# Altium footprint library ETA6003Q3Q.PcbLib: 3 footprints
Each footprint in its own frame and in the unit in brackets; x right, y up, seen from the top. Pads: shape width x height; smd on the part's side, far side on the other; paste and mask are expansions set on the pad; w line width, h text height; cw(c..) or ccw(c..) is an arc to the next point about the centre after c.
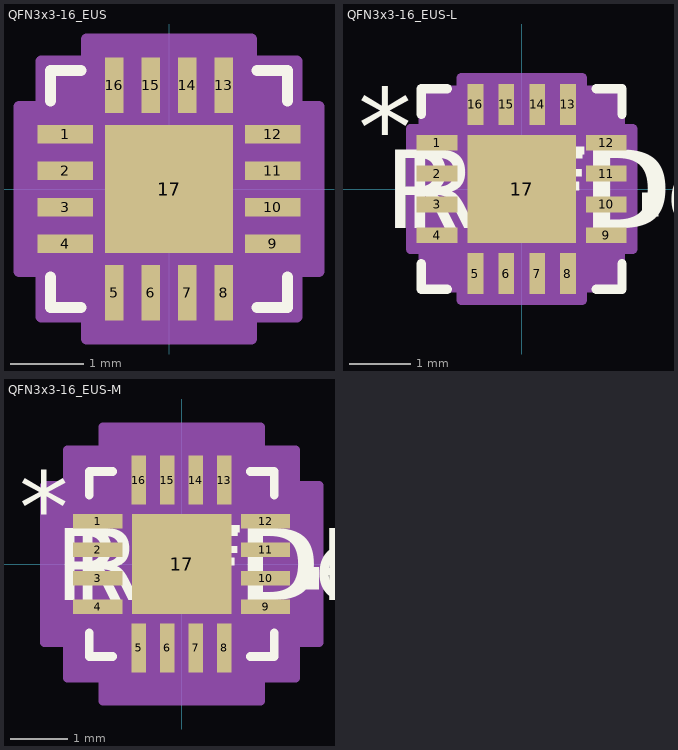
[diagram p0: the footprints below, top view; thin cyan lines are the x and y axes]

## QFN3x3-16_EUS [mil]
pads (17):
  rect 30x10 smd paste+0 mask+0: 1(-56,29.53) 2(-56,9.84) 3(-56,-9.84) 4(-56,-29.53) 9(56,-29.53) 10(56,-9.84) 11(56,9.84) 12(56,29.53)
  rect 10x30 smd paste+0 mask+0: 5(-29.53,-56) 6(-9.84,-56) 7(9.84,-56) 8(29.53,-56) 13(29.53,56) 14(9.84,56) 15(-9.84,56) 16(-29.53,56)
  rect 69x69 smd paste+0 mask+0: 17(0,0)
Top Overlay:
  lines w6: -64,-47.63 -64,-64 -47.63,-64 ; -64,47.63 -64,64 -47.63,64 ; 47.63,-64 64,-64 64,-47.63 ; 47.63,64 64,64 64,47.63
  text "." at -55,45 h50
Mechanical 13:
  lines w1: -59,9 -9,59 ; -59,-59 59,-59 59,59 -59,59 -59,-59 ; -59,-35.53 -59,-23.53 -59,-35.53 ; -59,-15.84 -59,-3.84 -59,-15.84 ; -59,3.84 -59,15.84 -59,3.84 ; -59,23.53 -59,35.53 -59,23.53 ; -35.53,-59 -23.53,-59 -35.53,-59 ; -35.53,59 -23.53,59 -35.53,59 ; -15.84,-59 -3.84,-59 -15.84,-59 ; -15.84,59 -3.84,59 -15.84,59 ; 3.84,-59 15.84,-59 3.84,-59 ; 3.84,59 15.84,59 3.84,59 ; 23.53,-59 35.53,-59 23.53,-59 ; 23.53,59 35.53,59 23.53,59 ; 59,-35.53 59,-23.53 59,-35.53 ; 59,-15.84 59,-3.84 59,-15.84 ; 59,3.84 59,15.84 59,3.84 ; 59,23.53 59,35.53 59,23.53
  text "*" at -53.5,14.37 h50
Mechanical 15:
  region: -44.53,-69 -69,-69 -69,-44.53 -81,-44.53 -81,44.53 -69,44.53 -69,69 -44.53,69 -44.53,81 44.53,81 44.53,69 69,69 69,44.53 81,44.53 81,-44.53 69,-44.53 69,-69 44.53,-69 44.53,-81 -44.53,-81
  lines w6: -81,-44.53 -69,-44.53 -69,-69 -44.53,-69 -44.53,-81 44.53,-81 44.53,-69 69,-69 69,-44.53 81,-44.53 81,44.53 69,44.53 69,69 44.53,69 44.53,81 -44.53,81 -44.53,69 -69,69 -69,44.53 -81,44.53 -81,-44.53
3D body "QFN3x3-16_EUS.step": height 32.09, standoff 0, extent -59.02,-59.02 59.02,59.02

## QFN3x3-16_EUS-L [mil]
pads (17):
  rect 26x10 smd paste+0 mask+0: 1(-54,29.53) 2(-54,9.84) 3(-54,-9.84) 4(-54,-29.53) 9(54,-29.53) 10(54,-9.84) 11(54,9.84) 12(54,29.53)
  rect 10x26 smd paste+0 mask+0: 5(-29.53,-54) 6(-9.84,-54) 7(9.84,-54) 8(29.53,-54) 13(29.53,54) 14(9.84,54) 15(-9.84,54) 16(-29.53,54)
  rect 69x69 smd paste+0 mask+0: 17(0,0)
Top Overlay:
  region: 77,-2.34 87,-2.34 87,-17.34 77,-17.34
  lines w6: -64,-47.63 -64,-64 -47.63,-64 ; -64,47.63 -64,64 -47.63,64 ; 47.63,-64 64,-64 64,-47.63 ; 47.63,64 64,64 64,47.63
  text "*" at -104.5,14.37 h50
  text "RefDes" at -75,-25 h50
  text "REFDES" at -87.5,-25 h50
Mechanical 13:
  lines w1: -59,9 -9,59 ; -59,-59 59,-59 59,59 -59,59 -59,-59 ; -59,-35.53 -59,-23.53 -59,-35.53 ; -59,-15.84 -59,-3.84 -59,-15.84 ; -59,3.84 -59,15.84 -59,3.84 ; -59,23.53 -59,35.53 -59,23.53 ; -35.53,-59 -23.53,-59 -35.53,-59 ; -35.53,59 -23.53,59 -35.53,59 ; -15.84,-59 -3.84,-59 -15.84,-59 ; -15.84,59 -3.84,59 -15.84,59 ; 3.84,-59 15.84,-59 3.84,-59 ; 3.84,59 15.84,59 3.84,59 ; 23.53,-59 35.53,-59 23.53,-59 ; 23.53,59 35.53,59 23.53,59 ; 59,-35.53 59,-23.53 59,-35.53 ; 59,-15.84 59,-3.84 59,-15.84 ; 59,3.84 59,15.84 59,3.84 ; 59,23.53 59,35.53 59,23.53
  text "*" at -53.5,14.37 h50
  text "RefDes2" at -87.5,-25 h50
Mechanical 15:
  region: -38.53,-63 -63,-63 -63,-38.53 -71,-38.53 -71,38.53 -63,38.53 -63,63 -38.53,63 -38.53,71 38.53,71 38.53,63 63,63 63,38.53 71,38.53 71,-38.53 63,-38.53 63,-63 38.53,-63 38.53,-71 -38.53,-71
  lines w6: -71,-38.53 -63,-38.53 -63,-63 -38.53,-63 -38.53,-71 38.53,-71 38.53,-63 63,-63 63,-38.53 71,-38.53 71,38.53 63,38.53 63,63 38.53,63 38.53,71 -38.53,71 -38.53,63 -63,63 -63,38.53 -71,38.53 -71,-38.53
3D body "QFN3x3-16_EUS.step": height 32.09, standoff 0, extent -59.02,-59.02 59.02,59.02

## QFN3x3-16_EUS-M [mil]
pads (17):
  rect 34x10 smd paste+0 mask+0: 1(-58,29.53) 2(-58,9.84) 3(-58,-9.84) 4(-58,-29.53) 9(58,-29.53) 10(58,-9.84) 11(58,9.84) 12(58,29.53)
  rect 10x34 smd paste+0 mask+0: 5(-29.53,-58) 6(-9.84,-58) 7(9.84,-58) 8(29.53,-58) 13(29.53,58) 14(9.84,58) 15(-9.84,58) 16(-29.53,58)
  rect 69x69 smd paste+0 mask+0: 17(0,0)
Top Overlay:
  region: 85,-2.34 95,-2.34 95,-17.34 85,-17.34
  lines w6: -64,-47.63 -64,-64 -47.63,-64 ; -64,47.63 -64,64 -47.63,64 ; 47.63,-64 64,-64 64,-47.63 ; 47.63,64 64,64 64,47.63
  text "REFDES" at -87.5,-25 h50
  text "RefDes" at -75,-25 h50
  text "*" at -112.5,14.37 h50
Mechanical 13:
  lines w1: -59,9 -9,59 ; -59,-59 -59,59 59,59 59,-59 -59,-59 ; -59,-35.53 -59,-23.53 -59,-35.53 ; -59,-15.84 -59,-3.84 -59,-15.84 ; -59,3.84 -59,15.84 -59,3.84 ; -59,23.53 -59,35.53 -59,23.53 ; -35.53,-59 -23.53,-59 -35.53,-59 ; -35.53,59 -23.53,59 -35.53,59 ; -15.84,-59 -3.84,-59 -15.84,-59 ; -15.84,59 -3.84,59 -15.84,59 ; 3.84,-59 15.84,-59 3.84,-59 ; 3.84,59 15.84,59 3.84,59 ; 23.53,-59 35.53,-59 23.53,-59 ; 23.53,59 35.53,59 23.53,59 ; 59,-35.53 59,-23.53 59,-35.53 ; 59,-15.84 59,-3.84 59,-15.84 ; 59,3.84 59,15.84 59,3.84 ; 59,23.53 59,35.53 59,23.53
  text "RefDes2" at -87.5,-25 h50
  text "*" at -53.5,14.37 h50
Mechanical 15:
  region: -54.53,-79 -79,-79 -79,-54.53 -95,-54.53 -95,54.53 -79,54.53 -79,79 -54.53,79 -54.53,95 54.53,95 54.53,79 79,79 79,54.53 95,54.53 95,-54.53 79,-54.53 79,-79 54.53,-79 54.53,-95 -54.53,-95
  lines w6: -95,-54.53 -95,54.53 -79,54.53 -79,79 -54.53,79 -54.53,95 54.53,95 54.53,79 79,79 79,54.53 95,54.53 95,-54.53 79,-54.53 79,-79 54.53,-79 54.53,-95 -54.53,-95 -54.53,-79 -79,-79 -79,-54.53 -95,-54.53
3D body "QFN3x3-16_EUS.step": height 32.09, standoff 0, extent -59.02,-59.02 59.02,59.02